# Altium footprint library PcbLib1.PcbLib: 332 footprints (part 16 of 22)
Each footprint in its own frame and in the unit in brackets; x right, y up, seen from the top. Pads: shape width x height; smd on the part's side, far side on the other; paste and mask are expansions set on the pad; w line width, h text height; cw(c..) or ccw(c..) is an arc to the next point about the centre after c.
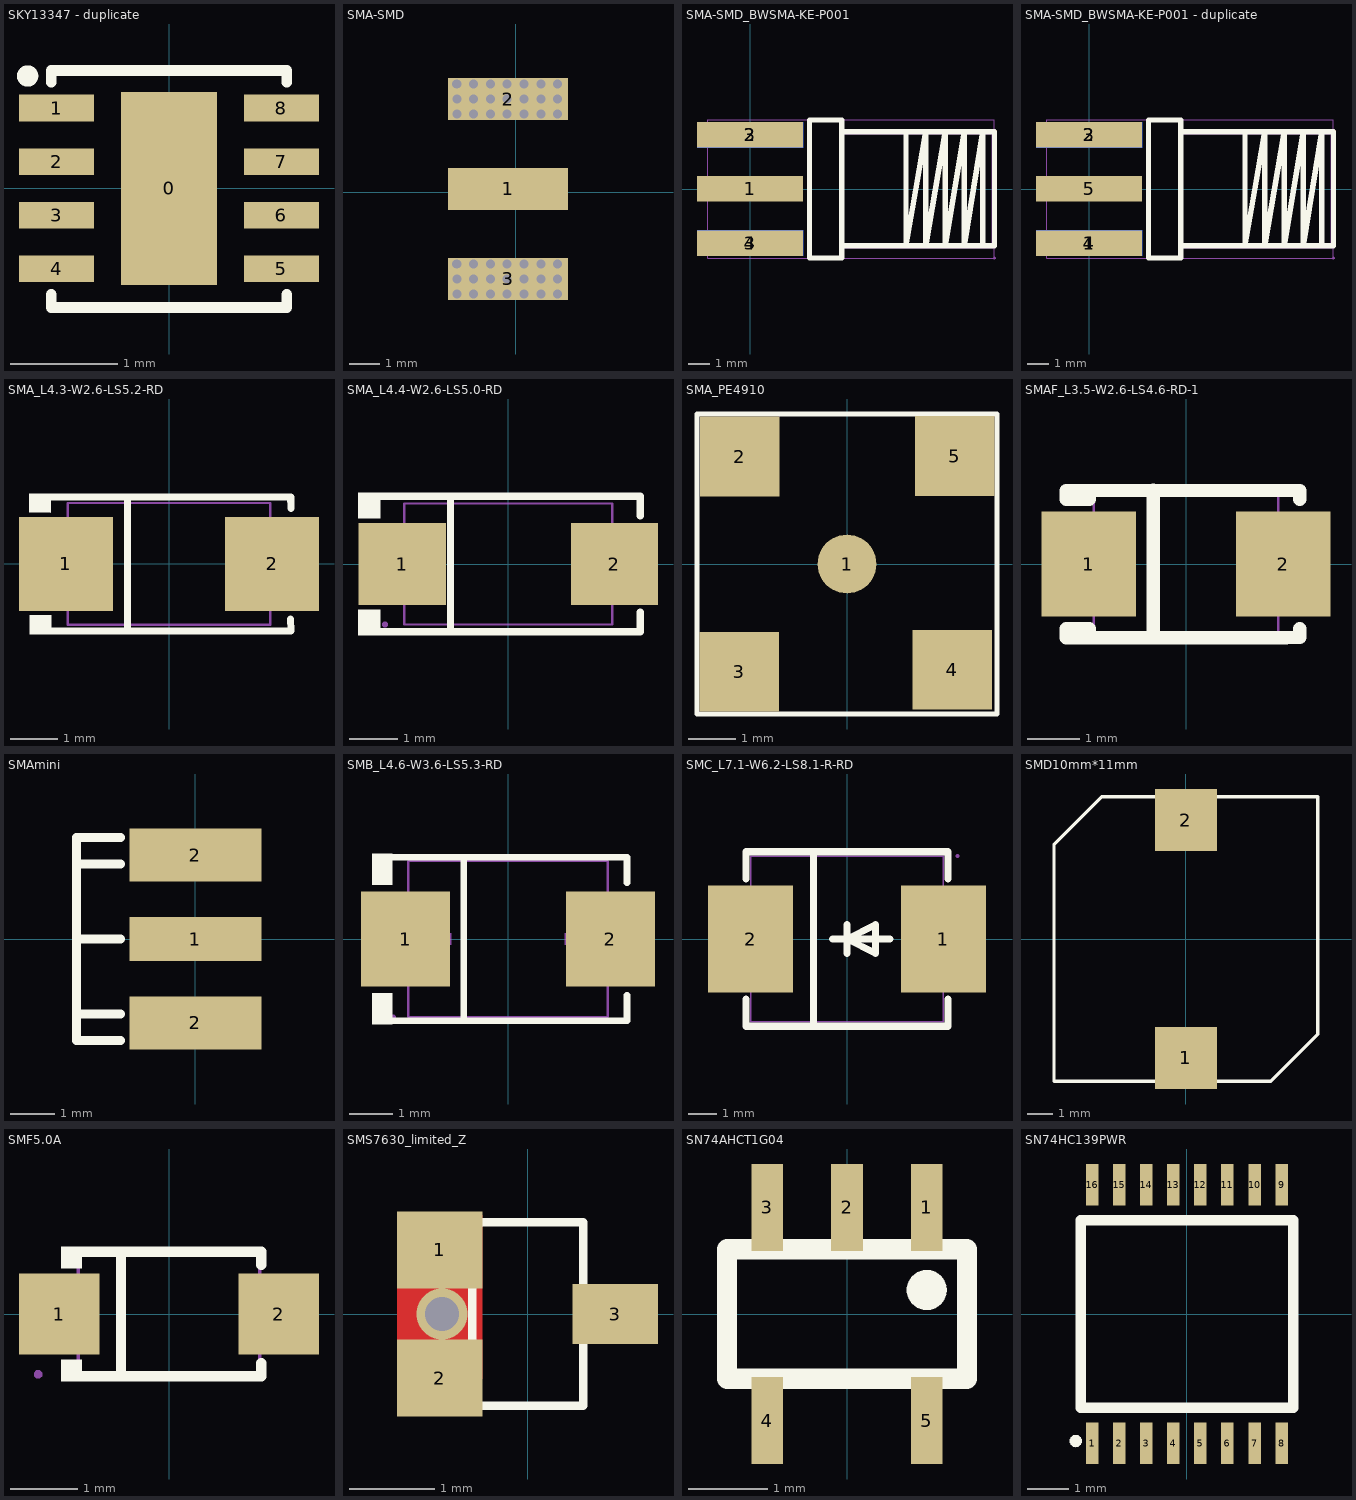
[diagram p15: the footprints below, top view; thin cyan lines are the x and y axes]

## SKY13347 - duplicate [mm]
height 0.15
pads (9):
  rect 0.9x1.8 smd: 0(0,0)
  rect 0.7x0.25 smd: 1(-1.05,0.75) 2(-1.05,0.25) 3(-1.05,-0.25) 4(-1.05,-0.75) 5(1.05,-0.75) 6(1.05,-0.25) 7(1.05,0.25) 8(1.05,0.75)
Top Overlay:
  circle w0.1: c-1.32,1.05 r0.05
  lines w0.1: -1.1,-0.99 -1.1,-1.11 1.1,-1.11 1.1,-0.99 ; -1.1,0.99 -1.1,1.1 1.1,1.1 1.1,0.99

## SMA-SMD [mm]
pads (3):
  rect 4x1.4 smd mask+0: 1(-0.253,0.108) 2(-0.253,3.105) 3(-0.253,-2.889)
via -1.959,-3.388 diameter 0.4 hole 0.3
via -1.96,-2.889 diameter 0.4 hole 0.3
via -1.96,-2.389 diameter 0.4 hole 0.3
via -1.959,2.606 diameter 0.4 hole 0.3
via -1.96,3.105 diameter 0.4 hole 0.3
via -1.96,3.605 diameter 0.4 hole 0.3
via 0.841,-3.388 diameter 0.4 hole 0.3
via 0.281,-3.388 diameter 0.4 hole 0.3
via -0.279,-3.388 diameter 0.4 hole 0.3
via -0.839,-3.388 diameter 0.4 hole 0.3
via 1.401,-3.388 diameter 0.4 hole 0.3
via -1.399,-3.388 diameter 0.4 hole 0.3
via 0.84,-2.889 diameter 0.4 hole 0.3
via 0.28,-2.889 diameter 0.4 hole 0.3
via -0.28,-2.889 diameter 0.4 hole 0.3
via -0.84,-2.889 diameter 0.4 hole 0.3
via 1.4,-2.889 diameter 0.4 hole 0.3
via -1.4,-2.889 diameter 0.4 hole 0.3
via 0.84,-2.389 diameter 0.4 hole 0.3
via 0.28,-2.389 diameter 0.4 hole 0.3
via -0.28,-2.389 diameter 0.4 hole 0.3
via -0.84,-2.389 diameter 0.4 hole 0.3
via 1.4,-2.389 diameter 0.4 hole 0.3
via -1.4,-2.389 diameter 0.4 hole 0.3
via 0.841,2.606 diameter 0.4 hole 0.3
via 0.281,2.606 diameter 0.4 hole 0.3
via -0.279,2.606 diameter 0.4 hole 0.3
via -0.839,2.606 diameter 0.4 hole 0.3
via 1.401,2.606 diameter 0.4 hole 0.3
via -1.399,2.606 diameter 0.4 hole 0.3
via 0.84,3.105 diameter 0.4 hole 0.3
via 0.28,3.105 diameter 0.4 hole 0.3
via -0.28,3.105 diameter 0.4 hole 0.3
via -0.84,3.105 diameter 0.4 hole 0.3
via 1.4,3.105 diameter 0.4 hole 0.3
via -1.4,3.105 diameter 0.4 hole 0.3
via 0.84,3.605 diameter 0.4 hole 0.3
via 0.28,3.605 diameter 0.4 hole 0.3
via -0.28,3.605 diameter 0.4 hole 0.3
via -0.84,3.605 diameter 0.4 hole 0.3
via 1.4,3.605 diameter 0.4 hole 0.3
via -1.4,3.605 diameter 0.4 hole 0.3

## SMA-SMD_BWSMA-KE-P001 [mm]
pads (5):
  rect 5x1.2 smd mask+0.051: 1(0,0) 2(0,2.55) 3(0,-2.55)
  rect 5x1.2 smd far side mask+0.051: 3(0,2.55) 4(0,-2.55)
Top Overlay:
  lines w0.254: 2.794,-3.25 4.318,-3.25 4.318,3.25 2.794,3.25 2.794,-3.175 ; 4.318,-2.667 10.945,-2.667 ; 4.318,2.689 10.945,2.689 ; 7.335,2.689 7.335,-2.667 8.26,2.689 8.26,-2.667 9.186,2.689 9.186,-2.667 10.075,2.689 10.075,-2.667 10.945,2.689 ; 11.5,-2.68 11.5,2.7 11.489,2.689 10.945,2.689 ; 11.5,-2.667 10.945,-2.667 ; 10.945,-2.667 10.945,2.689
Mechanical 6:
  region: 4.43,2.81 4.43,2.57 11.38,2.57 11.38,-2.55 4.43,-2.55 4.43,-2.79 11.5,-2.79 11.62,-2.67 11.62,2.72 11.53,2.81
Mechanical 15:
  region: 11.56,-3.25 11.56,-3.225 11.525,-3.19 11.475,-3.19 11.44,-3.225 11.44,-3.25 11.44,-3.275 11.475,-3.31 11.525,-3.31 11.56,-3.275 11.56,-3.25
  region: -2,3 2,3 2,2.1 -2,2.1
  region: -2,0.45 2,0.45 2,-0.45 -2,-0.45
  region: -2,-2.1 2,-2.1 2,-3 -2,-3
  region: -2,3 2,3 2,2.1 -2,2.1
  region: -2,-2.1 2,-2.1 2,-3 -2,-3
  lines w0.051: -2,-3.25 11.5,-3.25 11.5,3.25 -2,3.25 -2,-3.25

## SMA-SMD_BWSMA-KE-P001 - duplicate [mm]
pads (5):
  rect 5x1.2 smd mask+0.051: 1(0,-2.55) 2(0,2.55) 5(0,0)
  rect 5x1.2 smd far side mask+0.051: 3(0,2.55) 4(0,-2.55)
Top Overlay:
  lines w0.254: 2.794,-3.25 4.318,-3.25 4.318,3.25 2.794,3.25 2.794,-3.175 ; 4.318,-2.667 10.945,-2.667 ; 4.318,2.689 10.945,2.689 ; 7.335,2.689 7.335,-2.667 8.26,2.689 8.26,-2.667 9.186,2.689 9.186,-2.667 10.075,2.689 10.075,-2.667 10.945,2.689 ; 11.5,-2.68 11.5,2.7 11.489,2.689 10.945,2.689 ; 11.5,-2.667 10.945,-2.667 ; 10.945,-2.667 10.945,2.689
Mechanical 6:
  region: 4.43,2.81 4.43,2.57 11.38,2.57 11.38,-2.55 4.43,-2.55 4.43,-2.79 11.5,-2.79 11.62,-2.67 11.62,2.72 11.53,2.81
Mechanical 15:
  region: -2,-2.1 2,-2.1 2,-3 -2,-3
  region: -2,3 2,3 2,2.1 -2,2.1
  region: -2,-2.1 2,-2.1 2,-3 -2,-3
  region: -2,0.45 2,0.45 2,-0.45 -2,-0.45
  region: -2,3 2,3 2,2.1 -2,2.1
  region: 11.56,-3.25 11.56,-3.225 11.525,-3.19 11.475,-3.19 11.44,-3.225 11.44,-3.25 11.44,-3.275 11.475,-3.31 11.525,-3.31 11.56,-3.275 11.56,-3.25
  lines w0.051: -2,-3.25 -2,3.25 11.5,3.25 11.5,-3.25 -2,-3.25

## SMA_L4.3-W2.6-LS5.2-RD [mm]
pads (2):
  rect 2x2 smd paste+0 mask+0.051: 1(-2.2,0) 2(2.2,0)
Top Overlay:
  region: -2.52,1.502 -2.521,1.096 -2.981,1.1 -2.977,1.502
  region: -2.512,-1.096 -2.513,-1.503 -2.973,-1.498 -2.969,-1.096
  lines w0.152: -2.596,-1.426 2.596,-1.426 ; -2.596,1.426 2.596,1.426 2.603,1.187 ; -0.884,-1.426 -0.884,1.426 ; 2.593,-1.176 2.6,-1.415
Mechanical 6:
  region: -2.317,-0.101 -2.317,0.101 -1.507,0.101 -1.507,-0.101
  region: 2.29,-0.09 2.29,0.112 1.48,0.112 1.48,-0.09
  region: 2.014,-0.675 2.014,0.675 1.811,0.675 1.811,-0.675
Mechanical 15:
  region: -2.545,-1.3 -2.545,-1.275 -2.58,-1.24 -2.63,-1.24 -2.665,-1.275 -2.665,-1.3 -2.665,-1.325 -2.63,-1.36 -2.58,-1.36 -2.545,-1.325 -2.545,-1.3
  region: 2.605,0.725 2.605,-0.725 1.48,-0.725 1.48,0.725
  region: -1.48,0.725 -1.48,-0.725 -2.605,-0.725 -2.605,0.725
  lines w0.051: -2.16,-1.3 -2.16,1.3 2.16,1.3 2.16,-1.3 -2.16,-1.3

## SMA_L4.4-W2.6-LS5.0-RD [mm]
pads (2):
  rect 1.8x1.7 smd paste+0 mask+0.051: 1(-2.192,0) 2(2.192,0)
Top Overlay:
  region: -2.65,1.477 -2.65,0.949 -3.107,0.949 -3.107,1.477
  region: -2.65,-1.477 -2.65,-0.949 -3.107,-0.949 -3.107,-1.477
  lines w0.152: -2.726,-1.401 2.726,-1.401 2.726,-1 ; -2.726,1.401 2.726,1.401 2.726,1 ; -1.197,-1.401 -1.197,1.401
Mechanical 6:
  region: -2.451,-0.099 -2.451,0.099 -1.656,0.099 -1.656,-0.099
  region: 2.451,-0.099 2.451,0.099 1.656,0.099 1.656,-0.099
  region: 2.153,-0.663 2.153,0.663 1.954,0.663 1.954,-0.663
Mechanical 15:
  region: -2.49,-1.25 -2.49,-1.225 -2.525,-1.19 -2.575,-1.19 -2.61,-1.225 -2.61,-1.25 -2.61,-1.275 -2.575,-1.31 -2.525,-1.31 -2.49,-1.275 -2.49,-1.25
  region: -1.35,0.725 -1.35,-0.725 -2.55,-0.725 -2.55,0.725
  region: 1.35,-0.725 1.35,0.725 2.55,0.725 2.55,-0.725
  lines w0.051: -2.15,-1.25 -2.15,1.25 2.15,1.25 2.15,-1.25 -2.15,-1.25

## SMA_PE4910 [mm]
pads (5):
  round 1.25 smd mask+0.051: 1(0,0)
  rect 1.7x1.7 smd: 2(-2.287,2.292) 3(-2.301,-2.297) 4(2.247,-2.256) 5(2.297,2.302)
Top Overlay:
  lines w0.076: -3.2,-1.8 -3.2,-2.5 -3.2,-3.2 -2.5,-3.2 -1.8,-3.2 ; -3.2,1.8 -3.2,2.5 -3.2,3.2 -2.5,3.2 -1.8,3.2 ; 1.8,-3.2 2.5,-3.2 3.2,-3.2 3.2,-2.5 3.2,-1.8 ; 1.8,3.2 2.5,3.2 3.2,3.2 3.2,2.5 3.2,1.8
  lines w0.1: -3.2,-3.2 3.2,-3.2 3.2,3.2 -3.2,3.2 -3.2,-3.2

## SMAF_L3.5-W2.6-LS4.6-RD-1 [mm]
pads (2):
  rect 1.8x2 smd paste+0 mask+0.051: 1(-1.85,0) 2(1.85,0)
Top Overlay:
  lines w0.254: -2.027,-1.4 -2.027,-1.231 ; -2.027,1.397 -2.027,1.231 ; -1.84,-1.4 -1.84,-1.231 -2.027,-1.231 ; -1.84,1.397 -1.84,1.231 -2.027,1.231 ; -0.62,-1.4 -0.62,1.4 ; 1.91,-1.4 -1.89,-1.4 -2.276,-1.4 -2.276,-1.231 -2.027,-1.231 ; 1.91,-1.397 2.159,-1.397 2.159,-1.231 ; 2.159,1.231 2.159,1.397 1.915,1.397 -2.276,1.397 -2.276,1.231 -2.027,1.231
Mechanical 6:
  region: 1.82,-0.723 1.82,0.677 2.12,0.677 2.12,-0.723
  region: 1.27,0.127 2.67,0.127 2.67,-0.173 1.27,-0.173
  region: -2.667,0.127 -1.267,0.127 -1.267,-0.173 -2.667,-0.173
Mechanical 15:
  region: -2.24,-1.3 -2.24,-1.275 -2.275,-1.24 -2.325,-1.24 -2.36,-1.275 -2.36,-1.3 -2.36,-1.325 -2.325,-1.36 -2.275,-1.36 -2.24,-1.325 -2.24,-1.3
  region: -1.55,-0.7 -2.3,-0.7 -2.3,0.7 -1.55,0.7
  region: 2.3,-0.7 1.55,-0.7 1.55,0.7 2.3,0.7
  lines w0.051: -1.75,-1.3 -1.75,1.3 1.75,1.3 1.75,-1.3 -1.75,-1.3

## SMAmini [mm] "R2000 Module"
height 0.6
pads (3):
  rect 3x1 smd: 1(0,0)
  rect 3x1.2 smd: 2(0,-1.9) 2(0,1.9)
Top Overlay:
  lines w0.2: -2.6,-1.7 -1.7,-1.7 ; -2.6,0 -1.7,0 ; -2.6,1.7 -1.7,1.7 ; -1.7,-2.3 -2.7,-2.3 -2.7,2.3 -1.7,2.3

## SMB_L4.6-W3.6-LS5.3-RD [mm]
pads (2):
  rect 2.047x2.192 smd paste+0 mask+0.051: 1(-2.361,0) 2(2.361,0)
Top Overlay:
  region: -2.668,-1.962 -2.668,-1.249 -3.125,-1.249 -3.125,-1.962
  region: -2.668,1.962 -2.668,1.249 -3.125,1.249 -3.125,1.962
  lines w0.152: -2.744,-1.886 2.744,-1.886 2.744,-1.299 ; -2.744,1.886 2.744,1.886 2.744,1.299 ; -1.016,-1.886 -1.016,1.886
Mechanical 6:
  region: 1.989,-0.905 1.989,0.905 1.717,0.905 1.717,-0.905
  region: 2.396,-0.136 2.396,0.136 1.31,0.136 1.31,-0.136
  region: -2.396,-0.136 -2.396,0.136 -1.31,0.136 -1.31,-0.136
Mechanical 15:
  region: 2.649,-1.015 2.649,1.015 1.509,1.015 1.509,-1.015
  region: -2.649,-1.015 -2.649,1.015 -1.509,1.015 -1.509,-1.015
  region: -2.59,-1.8 -2.59,-1.775 -2.625,-1.74 -2.674,-1.74 -2.709,-1.775 -2.709,-1.8 -2.709,-1.825 -2.674,-1.86 -2.625,-1.86 -2.59,-1.825 -2.59,-1.8
  lines w0.051: -2.3,-1.8 2.3,-1.8 2.3,1.8 -2.3,1.8 -2.3,-1.8

## SMC_L7.1-W6.2-LS8.1-R-RD [mm]
pads (2):
  rect 3.03x3.82 smd paste+0 mask+0.051: 1(3.435,0) 2(-3.435,0)
Top Overlay:
  lines w0.254: -3.6,-2.141 -3.6,-3.11 3.6,-3.11 3.6,-2.141 ; -3.6,2.141 -3.6,3.11 3.6,3.11 3.6,2.141 ; -1.192,-3.11 -1.192,3.11 ; -0.508,0 1.524,0 ; 0,0.508 0,-0.508 0,0 ; 0,0 1.016,0.508 1.016,-0.508 0,0
Mechanical 6:
  region: -4.33,0.254 -2.552,0.254 -2.552,-0.254 -4.33,-0.254
  region: 3.181,-0.895 3.181,0.883 3.689,0.883 3.689,-0.895
  region: 2.54,0.254 4.318,0.254 4.318,-0.254 2.54,-0.254
Mechanical 15:
  region: 2.928,1.475 3.943,1.475 3.943,-1.475 2.928,-1.475
  region: -2.928,-1.475 -3.943,-1.475 -3.943,1.475 -2.928,1.475
  region: 4.003,2.952 4.003,2.977 3.968,3.012 3.918,3.012 3.883,2.977 3.883,2.952 3.883,2.927 3.918,2.892 3.968,2.892 4.003,2.927 4.003,2.952
  lines w0.051: -3.428,-2.952 -3.428,2.952 3.428,2.952 3.428,-2.952 -3.428,-2.952

## SMD10mm*11mm [mm] "100uH"
pads (2):
  rect 2.4x2.4 smd: 1(0,-4.6) 2(0,4.6)
Top Overlay:
  lines w0.127: 5.1,-3.683 5.1,5.5 -3.263,5.5 -3.302,5.461 -5.1,3.663 -5.1,-5.5 3.288,-5.5 5.105,-3.683

## SMF5.0A [mm]
pads (2):
  rect 1.2x1.2 smd: 1(-1.635,0) 2(1.635,0)
Top Overlay:
  region: -1.3,1.002 -1.3,0.682 -1.605,0.682 -1.605,1.002
  region: -1.3,-1.002 -1.3,-0.682 -1.605,-0.682 -1.605,-1.002
  lines w0.152: -1.376,-0.926 1.376,-0.926 1.376,-0.733 ; -1.376,0.926 1.376,0.926 1.376,0.733 ; -0.717,-0.876 -0.717,0.876
Mechanical 2:
  region: -2.032,0.127 -2.032,-0.065 -1.264,-0.065 -1.264,0.127
  region: 2.035,0.096 2.035,-0.096 1.267,-0.096 1.267,0.096
  region: 1.747,-0.384 1.555,-0.384 1.555,0.384 1.747,0.384
Mechanical 6:
  lines w0.051: -1.35,-0.9 -1.35,0.9 1.35,0.9 1.35,-0.9 -1.35,-0.9
Mechanical 8:
  region: -1.89,-0.9 -1.89,-0.925 -1.925,-0.96 -1.975,-0.96 -2.01,-0.925 -2.01,-0.9 -2.01,-0.875 -1.975,-0.84 -1.925,-0.84 -1.89,-0.875 -1.89,-0.9
Mechanical 9:
  region: 1.95,-0.475 1.15,-0.475 1.15,0.475 1.95,0.475
  region: -1.95,0.475 -1.15,0.475 -1.15,-0.475 -1.95,-0.475

## SMS7630_limited_Z [mm]
pads (3):
  rect 1x0.9 smd: 1(-1.025,0.75) 2(-1.025,-0.75)
  rect 1x0.7 smd: 3(1.025,0)
via -1.001,0 diameter 0.6 hole 0.4
Top Layer:
  region: -1.525,1.156 -1.525,-0.761 -0.525,-0.761 -0.525,1.156
Top Overlay:
  lines w0.1: -0.65,-1.075 0.65,-1.075 0.65,1.075 -0.65,1.075 -0.65,-1.075
3D body: height 1.14, standoff 0, extent -0.624,-1.057 0.776,1.067

## SN74AHCT1G04 [mm]
height 2.54
pads (5):
  rect 0.4x1.1 smd: 1(1.01,1.35) 2(0,1.35) 3(-1.01,1.35) 4(-1.01,-1.35) 5(1.01,-1.35)
Top Overlay:
  circle w0.254: c1.01,0.304 r0.127
  lines w0.254: -1.52,-0.82 1.52,-0.82 1.52,0.82 -1.52,0.82 -1.52,-0.82

## SN74HC139PWR [mm]
pads (17):
  rect 0.3x1 smd: 1(-2.275,-3.1) 2(-1.625,-3.1) 3(-0.975,-3.1) 4(-0.325,-3.1) 5(0.325,-3.1) 6(0.975,-3.1) 7(1.625,-3.1) 8(2.275,-3.1) 9(2.275,3.1) 10(1.625,3.1) 11(0.975,3.1) 12(0.325,3.1) 13(-0.325,3.1) 14(-0.975,3.1) 15(-1.625,3.1) 16(-2.275,3.1)
  round 0.3 on Top Overlay: ""(-2.667,-3.048)
Top Overlay:
  lines w0.254: -2.55,-2.25 2.55,-2.25 2.55,2.25 -2.55,2.25 -2.55,-2.25